# EAGLE library part 6130XX25721_61303425721 (library WR-PHD)
WR-PHD 2.54 mm Dual Socket Header Bottom Entry ARTICLE PROPERTIES: Pins:4;​ 6;​ 8;​ 10;​ 12;​ 16;​ 20;​ 24;​ 26;​ 32;​ 34 KIND PROPERTIES: Pitch：2.54 mm Quality Class:3 as per CECC 75 301-802 Rows：Dual Gender：Socket Header Type：Bottom Entry MATERIAL PROPERTIES: Insulator Material :PA46 Insulator Flammability Rating:UL94 V-0 Contact Material:Copper Alloy Contact Plating:Gold Contact Type:Stamped GENERAL INFORMATION Operating Temperature:-40 up to +125 °C Compliance:Lead free / RoHS ELECTRICAL PROPERTIES: Rated Current:3 A IR:3A Withstanding Voltage:500 V (AC) Contact Resistance:20 mΩ RISO:1000 MΩ CERTIFICATION UL Approval:E323964 PACKAGING PROPERTIES Packaging:Tube <https://katalog.we-online.com/media/images/v2/o33217v209%20Family_WR-PHD_6130xx25721.jpg> Details see: https://katalog.we-online.com/en/em/PHD_2_54_DUAL_SOCKET_HEADER_BOTTOM_ENTRY_6130XX25721 Updated by Yingchun,Shan 2019-10-22 2019 (C) Würth Elektronik
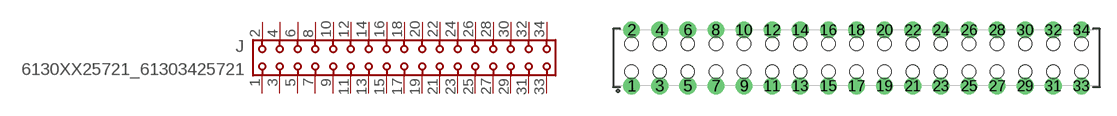
[diagram p198: symbol with the pads of 61303425721; footprint 61303425721]

Designator prefix J

## 6130XX25721_61303425721 (DATASHEET-URL: https://www.we-online.com/redexpert/spec/61303425721?ae; GENDER: Socket Header; IR: 3A; MOUNT: THT; PACKAGING: Tube; PART-NUMBER: 61303425721; PINS: 34; PITCH: 2.54 mm; ROWS: Dual; TYPE: Bottom Entry; VALUE: 61303425721)  [61303425721]
1  1  pas
2  2  pas
3  3  pas
4  4  pas
5  5  pas
6  6  pas
7  7  pas
8  8  pas
9  9  pas
10  10  pas
11  11  pas
12  12  pas
13  13  pas
14  14  pas
15  15  pas
16  16  pas
17  17  pas
18  18  pas
19  19  pas
20  20  pas
21  21  pas
22  22  pas
23  23  pas
24  24  pas
25  25  pas
26  26  pas
27  27  pas
28  28  pas
29  29  pas
30  30  pas
31  31  pas
32  32  pas
33  33  pas
34  34  pas

## Footprint 61303425721 (pad centres in mm)
WR-PHD 2.54 mm Dual Socket Header Bottom Entry,34 Pins
drill 1 pad 1.4: 1 -20.32,-2.54; 2 -20.32,2.54; 3 -17.78,-2.54; 4 -17.78,2.54; 5 -15.24,-2.54; 6 -15.24,2.54; 7 -12.7,-2.54; 8 -12.7,2.54; 9 -10.16,-2.54; 10 -10.16,2.54; 11 -7.62,-2.54; 12 -7.62,2.54; 13 -5.08,-2.54; 14 -5.08,2.54; 15 -2.54,-2.54; 16 -2.54,2.54; 17 0,-2.54; 18 0,2.54; 19 2.54,-2.54; 20 2.54,2.54; 21 5.08,-2.54; 22 5.08,2.54; 23 7.62,-2.54; 24 7.62,2.54; 25 10.16,-2.54; 26 10.16,2.54; 27 12.7,-2.54; 28 12.7,2.54; 29 15.24,-2.54; 30 15.24,2.54; 31 17.78,-2.54; 32 17.78,2.54; 33 20.32,-2.54; 34 20.32,2.54
hole 1.2 at -20.32,1.27
hole 1.2 at -17.78,1.27
hole 1.2 at -17.78,-1.27
hole 1.2 at -20.32,-1.27
hole 1.2 at -15.24,-1.27
hole 1.2 at -15.24,1.27
hole 1.2 at -12.7,1.27
hole 1.2 at -12.7,-1.27
hole 1.2 at -10.16,1.27
hole 1.2 at -10.16,-1.27
hole 1.2 at -7.62,-1.27
hole 1.2 at -7.62,1.27
hole 1.2 at -5.08,1.27
hole 1.2 at -5.08,-1.27
hole 1.2 at -2.54,-1.27
hole 1.2 at -2.54,1.27
hole 1.2 at 0,-1.27
hole 1.2 at 0,1.27
hole 1.2 at 2.54,1.27
hole 1.2 at 2.54,-1.27
hole 1.2 at 5.08,-1.27
hole 1.2 at 5.08,1.27
hole 1.2 at 7.62,-1.27
hole 1.2 at 7.62,1.27
hole 1.2 at 10.16,-1.27
hole 1.2 at 10.16,1.27
hole 1.2 at 12.7,-1.27
hole 1.2 at 12.7,1.27
hole 1.2 at 15.24,1.27
hole 1.2 at 15.24,-1.27
hole 1.2 at 17.78,1.27
hole 1.2 at 17.78,-1.27
hole 1.2 at 20.32,-1.27
hole 1.2 at 20.32,1.27